# Altium integrated library IRFZ48NPBF.IntLib: 1 symbol
Pins are listed as number, name and electrical type; pins without a type are passive.

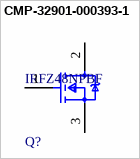
[diagram p0: symbol CMP-32901-000393-1]

## CMP-32901-000393-1
designator Q?, comment IRFZ48NPBF
MOSFET N-CH 55V 64A TO220AB; Threshold Voltage: 4V; Max Power Dissipation: 130W; Turn-On Delay Time: 12ns; Gate to Source Voltage (Vgs): 20V; Input Capacitance: 1.97nF; Rds On Max: 14mR; Element Configuration: Single; Rise Time: 78ns; Turn-Off Delay Time: 34ns; Halogen Free: Halogen Free; Drain to Source Breakdown Voltage: 55V; Continuous Drain Current (ID): 64A; Lead Free: Lead Free; Mount: Through Hole; Height: 0.65inch; Min Operating Temperature: -55°C; RoHS Compliant: Yes; Drain to Source Voltage (Vdss): 55V; Packaging: Rail/Tube; Length: 0.42inch; Max Operating Temperature: 175°C; Number of Pins: 3; Width: 0.19inch; Power Dissipation: 130W; Contact Plating: Tin; Case/Package: TO-220; REACH SVHC: No SVHC; Max Dual Supply Voltage: 55V; Drain to Source Resistance: 14mR
footprint FP-PG-TO220-3-MFG
pins: 1 G, 2 D, 3 S